# Altium footprint library jig.PcbLib: 30 footprints (part 1 of 2)
Each footprint in its own frame and in the unit in brackets; x right, y up, seen from the top. Pads: shape width x height; smd on the part's side, far side on the other; paste and mask are expansions set on the pad; w line width, h text height; cw(c..) or ccw(c..) is an arc to the next point about the centre after c.
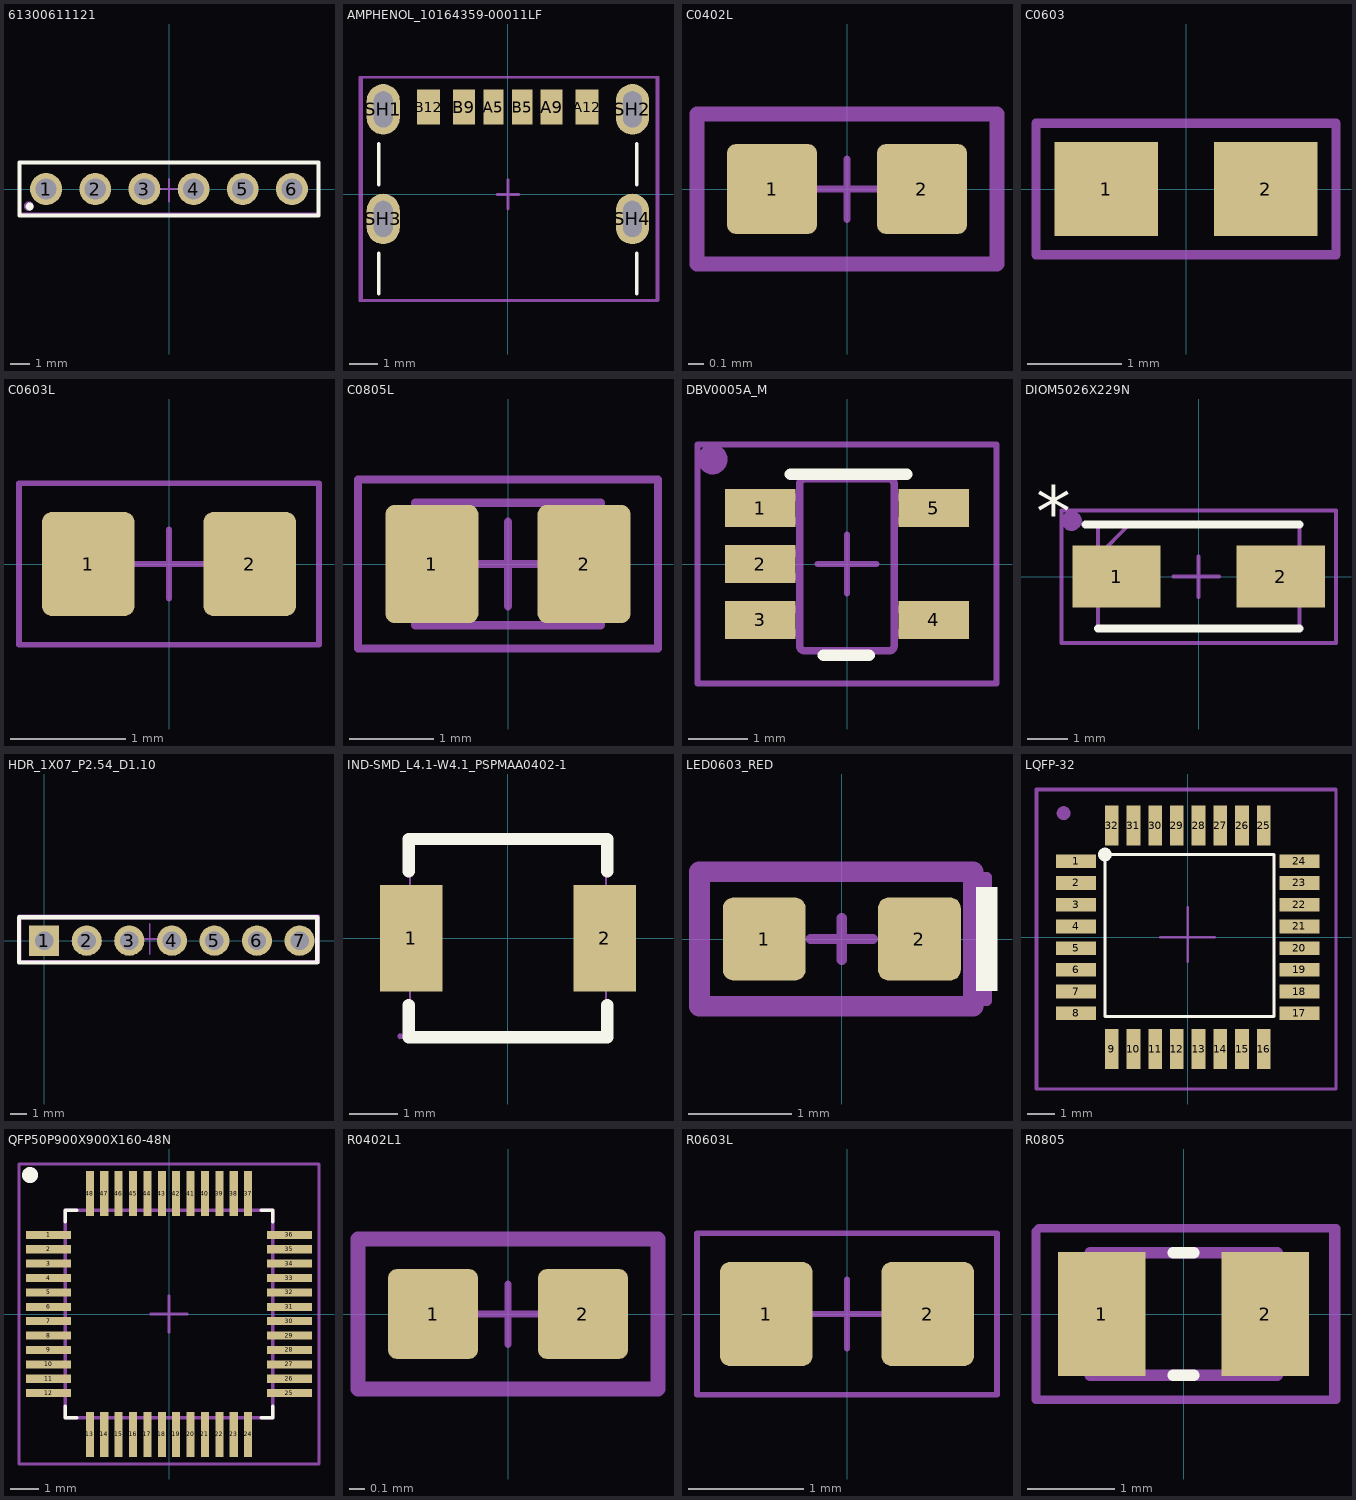
[diagram p0: the footprints below, top view; thin cyan lines are the x and y axes]

## 61300611121 [mm]
pads (6):
  round 1.65 hole 1.1: 1(-6.35,0) 2(-3.81,0) 3(-1.27,0) 4(1.27,0) 5(3.81,0) 6(6.35,0)
Top Overlay:
  circle w0.2: c-7.2,-0.9 r0.1
  lines w0.2: -7.72,-1.37 7.72,-1.37 7.72,1.37 -7.72,1.37 -7.72,-1.37
Mechanical 5:
  circle w0.254: c-7.239,-0.889 r0.127
  lines w0.1: -7.747,-1.27 7.747,-1.27 7.747,1.397 -7.747,1.397 -7.747,-1.27
  text ".Designator" at -1,-0.3 h1.52
Top Component Center (Mech15):
  lines w0.1: -0.635,0 0.635,0 ; 0,-0.635 0,0.508 ; -7.747,-1.397 7.747,-1.397 7.747,1.397 -7.747,1.397 -7.747,-1.397

## AMPHENOL_10164359-00011LF [mm]
height 3.26
pads (10):
  rect 0.7x1.2 smd: A5(-0.5,3.03) B5(0.5,3.03)
  rect 0.76x1.2 smd: A9(1.52,3.03) B9(-1.52,3.03)
  rect 0.8x1.2 smd: A12(2.75,3.03) B12(-2.75,3.03)
  oval 1.15x1.75 hole 0.65 slot 1.25 at 90 deg: SH1(-4.32,2.95) SH2(4.32,2.95) SH3(-4.32,-0.85) SH4(4.32,-0.85)
Top Overlay:
  lines w0.127: -4.47,-3.45 -4.47,-2.045 ; -4.47,0.345 -4.47,1.755 ; 4.47,-3.45 4.47,-2.045 ; 4.47,0.345 4.47,1.755
Mechanical 5:
  lines w0.1: -5.08,-3.683 5.207,-3.683 5.207,4.064 -5.08,4.064 -5.08,-3.683
  text ".Designator" at -0.612,-0.218 h1.52
Top Component Center (Mech15):
  lines w0.05: -5.145,-3.7 5.145,-3.7 5.145,4.075 -5.145,4.075 -5.145,-3.7
  lines w0.1: -0.381,0 0.381,0 ; 0,-0.508 0,0.508

## C0402L [mm]
height 0.7
pads (2):
  rrect20% 0.6x0.6 smd paste+0.05 mask+0.05: 1(-0.5,0) 2(0.5,0)
Mechanical 5:
  lines w0.1: -1,-0.5 1,-0.5 1,0.5 -1,0.5 -1,-0.5
  text ".Designator" at -0.725,-0.225 h0.7
Top Component Center (Mech15):
  lines w0.05: -0.2,0 0.2,0 ; 0,-0.2 0,0.2 ; -1,-0.5 1,-0.5 1,0.5 -1,0.5 -1,-0.5
3D body "User Library-Capacitor 0402.step": height 0.49, standoff -0.01, extent -0.5,-0.25 0.5,0.25

## C0603 [mm]
pads (2):
  rect 1.1x1 smd: 1(-0.85,0) 2(0.85,0)
Mechanical 5:
  lines w0.1: -1.6,-0.7 1.6,-0.7 1.6,0.7 -1.6,0.7 -1.6,-0.7
  text ".Designator" at -0.2,-0.255 h0.7
Top Component Center (Mech15):
  lines w0.051: -1.6,-0.7 1.6,-0.7 1.6,0.7 -1.6,0.7 -1.6,-0.7
3D body "step_temp.STEP": height 0.9, standoff 0, extent -0.8,-0.4 0.8,0.4

## C0603L [mm]
height 0.7
pads (2):
  rrect20% 0.8x0.9 smd mask+0.05: 1(-0.7,0) 2(0.7,0)
Mechanical 5:
  lines w0.05: -1.3,-0.7 -1.3,0.7 1.3,0.7 1.3,-0.7 -1.3,-0.7
  text ".Designator" at -1.02,-0.33 h1
Top Component Center (Mech15):
  lines w0.05: -0.3,0 0.3,0 ; 0,-0.3 0,0.3 ; -1.3,-0.7 -1.3,0.7 1.3,0.7 1.3,-0.7 -1.3,-0.7
3D body "CAPC1609X08M.step": height 0.8, standoff 0, extent -0.8,-0.45 0.8,0.45

## C0805L [mm]
height 0.7
pads (2):
  rrect20% 1.1x1.4 smd mask+0.05: 1(-0.9,0) 2(0.9,0)
Mechanical 5:
  lines w0.1: -1.775,-1 -1.775,1 1.775,1 1.775,-1 -1.775,-1
  text ".Designator" at -1.357,-0.413 h1.32
Mechanical 13:
  lines w0.1: -0.65,-0.725 -0.65,0.725 ; 0.65,-0.725 0.65,0.725 ; -1.1,-0.725 -1.1,0.725 1.1,0.725 1.1,-0.725 -1.1,-0.725
Top Component Center (Mech15):
  lines w0.1: -0.5,0 0.5,0 ; 0,-0.5 0,0.5 ; -1.775,-1 -1.775,1 1.775,1 1.775,-1 -1.775,-1
3D body: height 1.1, standoff 0, extent 0.651,-0.724 1.099,0.724
3D body: height 1.1, standoff 0, extent -0.649,-0.724 0.649,0.724
3D body: height 1.1, standoff 0, extent -1.099,-0.724 -0.651,0.724

## DBV0005A_M [mm]
pads (5):
  rect 1.2x0.65 smd paste+0 mask+0: 1(-1.475,0.95) 2(-1.475,0) 3(-1.475,-0.95) 4(1.475,-0.95) 5(1.475,0.95)
Top Overlay:
  lines w0.2: -0.959,1.524 1.016,1.524 ; -0.4,-1.55 0.375,-1.55
Mechanical 5:
  circle w0.254: c-2.286,1.778 r0.127
  lines w0.1: -2.54,-2.032 -2.54,2.032 2.54,2.032 2.54,-2.032 -2.54,-2.032
  text ".Designator" at -0.762,-0.127 h1.52
Mechanical 13:
  lines w0.127: -0.801,1.371 cw(c-0.725,1.37) -0.725,1.446 ; -0.801,1.37 -0.801,-1.399 -0.801,-1.4 ccw(c-0.725,-1.399) -0.725,-1.475 ; -0.801,1.37 -0.801,1.371 ; -0.725,-1.475 -0.725,-1.475 ; -0.725,-1.475 0.723,-1.475 0.724,-1.475 ccw(c0.723,-1.399) 0.799,-1.4 0.799,-1.399 0.799,1.37 ; -0.725,1.446 0.723,1.446 0.724,1.446 cw(c0.723,1.37) 0.799,1.371 ; -0.725,1.446 -0.725,1.446 ; 0.799,1.37 0.799,1.371 ; -1.423,-1.167 -1.199,-1.167 -1.105,-1.167 -1.088,-1.167 -0.835,-1.167 -0.801,-1.167 -0.801,-0.767 -0.835,-0.767 -1.088,-0.767 -1.105,-0.767 -1.199,-0.767 -1.423,-0.767 -1.423,-1.167 ; -1.423,-0.215 -1.199,-0.215 -1.105,-0.215 -1.088,-0.215 -0.835,-0.215 -0.801,-0.215 -0.801,0.186 -0.835,0.186 -1.088,0.186 -1.105,0.186 -1.199,0.186 -1.423,0.186 -1.423,-0.215 ; -1.423,0.738 -1.199,0.738 -1.105,0.738 -1.088,0.738 -0.835,0.738 -0.801,0.738 -0.801,1.138 -0.835,1.138 -1.088,1.138 -1.105,1.138 -1.199,1.138 -1.423,1.138 -1.423,0.738 ; 0.799,-1.167 0.799,-0.767 0.834,-0.767 1.087,-0.767 1.103,-0.767 1.198,-0.767 1.422,-0.767 1.422,-1.167 1.198,-1.167 1.103,-1.167 1.087,-1.167 0.834,-1.167 0.799,-1.167 ; 0.799,0.738 0.799,1.138 0.834,1.138 1.087,1.138 1.103,1.138 1.198,1.138 1.422,1.138 1.422,0.738 1.198,0.738 1.103,0.738 1.087,0.738 0.834,0.738 0.799,0.738
Top Component Center (Mech15):
  lines w0.05: -2.55,-2.05 -2.55,2.05 2.55,2.05 2.55,-2.05 -2.55,-2.05
  lines w0.1: -0.5,0 0.5,0 ; 0,-0.5 0,0.5

## DIOM5026X229N [mm]
pads (2):
  rect 2.2x1.55 smd paste+0 mask+0.102: 1(-2.05,0) 2(2.05,0)
Top Overlay:
  lines w0.2: -2.825,1.298 2.52,1.298 ; -2.52,-1.298 2.52,-1.298
  text "*" at -4.064,1.016 h1.27
Mechanical 5:
  circle w0.254: c-3.175,1.397 r0.127
  lines w0.1: -3.429,-1.651 -3.429,1.651 3.429,1.651 3.429,-1.651 -3.429,-1.651
  text ".Designator" at -1.905,0 h1.52
Mechanical 13:
  lines w0.1: -2.52,0.522 -1.745,1.298 ; -2.52,0.522 -2.52,1.298 -1.745,1.298 ; -2.52,0.522 -2.52,-1.298 2.52,-1.298 2.52,1.298 -1.745,1.298
Top Component Center (Mech15):
  lines w0.1: -0.635,0 0.508,0 ; 0,-0.508 0,0.508 ; -3.429,-1.651 3.429,-1.651 3.429,1.651 -3.429,1.651 -3.429,-1.651

## HDR_1X07_P2.54_D1.10 [mm]
pads (7):
  rect 1.8x1.8 hole 1.1: 1(0,0)
  round 1.8 hole 1.1: 2(2.54,0) 3(5.08,0) 4(7.62,0) 5(10.16,0) 6(12.7,0) 7(15.24,0)
Top Overlay:
  lines w0.254: -1.5,-1.3 -1.5,1.4 16.3,1.4 16.3,-1.3 -1.5,-1.3
Mechanical 5:
  lines w0.1: -1.4,-1.2 16.4,-1.2 16.4,1.3 -1.4,1.3 -1.4,-1.2
  text ".Designator" at 6.1,-0.1 h1.52
Top Component Center (Mech15):
  lines w0.1: 5.2,0.1 7.4,0.1 ; 6.3,-0.8 6.3,1 ; -1.5,-1.3 -1.5,1.5 16.4,1.5 16.4,-1.3 -1.5,-1.3
3D body "pin_header_7.STEP": height 10.62, standoff -3.38, extent -1.471,-1.21 16.309,1.33

## IND-SMD_L4.1-W4.1_PSPMAA0402-1 [mm]
pads (2):
  rect 1.3x2.2 smd: 1(-1.999,0) 2(2.002,0)
Top Overlay:
  lines w0.254: -2.05,-1.382 -2.05,-2.05 2.05,-2.05 2.05,-1.382 ; -2.05,1.382 -2.05,2.05 2.05,2.05 2.05,1.382
Mechanical 7:
  lines w0.051: -2.024,-2.024 2.027,-2.024 2.027,2.024 -2.024,2.024 -2.024,-2.024
Mechanical 8:
  region: -2.164,-2.024 -2.174,-2.057 -2.2,-2.08 -2.233,-2.085 -2.263,-2.07 -2.281,-2.042 -2.281,-2.009 -2.263,-1.981 -2.233,-1.966 -2.2,-1.971 -2.174,-1.994
Mechanical 9:
  region: 1.425,1.001 2.225,1.001 2.225,-1.001 1.425,-1.001
  region: -2.225,1.001 -1.425,1.001 -1.425,-1.001 -2.225,-1.001
3D body "IND_SRP4020TA_BRN.step": height 2.01, standoff 0, extent -2.35,-2.159 2.35,2.159

## LED0603_RED [mm]
height 0.7
pads (2):
  rrect25% 0.8x0.8 smd mask+0.05: 1(-0.75,0) 2(0.75,0)
Top Overlay:
  region: 1.5,-0.5 1.5,0.5 1.3,0.5 1.3,-0.5
Mechanical 5:
  lines w0.2: -1.375,-0.65 -1.375,0.65 1.27,0.65 1.27,-0.65 -1.375,-0.65
  text ".Designator" at 0,0 h0.7
Top Component Center (Mech15):
  lines w0.1: -0.3,0 0.3,0 ; 0,-0.2 0,0.2 ; -1.4,-0.6 1.4,-0.6 1.4,0.6 -1.4,0.6 -1.4,-0.6
3D body "User Library-LED_0603_R.STEP": height 0.6, standoff 0, extent -0.8,-0.4 0.8,0.4

## LQFP-32 [mm]
pads (32):
  rect 1.462x0.507 smd paste+0 mask+0: 1(-4.115,2.8) 2(-4.115,2) 3(-4.115,1.2) 4(-4.115,0.4) 5(-4.115,-0.4) 6(-4.115,-1.2) 7(-4.115,-2) 8(-4.115,-2.8) 17(4.115,-2.8) 18(4.115,-2) 19(4.115,-1.2) 20(4.115,-0.4) 21(4.115,0.4) 22(4.115,1.2) 23(4.115,2) 24(4.115,2.8)
  rect 0.507x1.462 smd paste+0 mask+0: 9(-2.8,-4.115) 10(-2,-4.115) 11(-1.2,-4.115) 12(-0.4,-4.115) 13(0.4,-4.115) 14(1.2,-4.115) 15(2,-4.115) 16(2.8,-4.115) 25(2.8,4.115) 26(2,4.115) 27(1.2,4.115) 28(0.4,4.115) 29(-0.4,4.115) 30(-1.2,4.115) 31(-2,4.115) 32(-2.8,4.115)
Top Overlay:
  circle w0.254: c-3.048,3.048 r0.127
  lines w0.1: -3.048,-2.921 -3.048,3.048 3.175,3.048 3.175,-2.921 -3.048,-2.921
Mechanical 5:
  circle w0.254: c-4.572,4.572 r0.127
  lines w0.1: -5.588,-5.588 -5.588,5.461 5.461,5.461 5.461,-5.588 -5.588,-5.588
  text ".Designator" at -1.524,0 h1.52
Top Component Center (Mech15):
  lines w0.1: -1.016,0 0.984,0 ; 0,-0.889 0,1.111 ; -5.539,-5.588 5.461,-5.588 5.461,5.412 -5.539,5.412 -5.539,-5.588

## QFP50P900X900X160-48N [mm]
pads (48):
  rect 1.56x0.28 smd: 1(-4.18,2.75) 2(-4.18,2.25) 3(-4.18,1.75) 4(-4.18,1.25) 5(-4.18,0.75) 6(-4.18,0.25) 7(-4.18,-0.25) 8(-4.18,-0.75) 9(-4.18,-1.25) 10(-4.18,-1.75) 11(-4.18,-2.25) 12(-4.18,-2.75) 25(4.18,-2.75) 26(4.18,-2.25) 27(4.18,-1.75) 28(4.18,-1.25) 29(4.18,-0.75) 30(4.18,-0.25) 31(4.18,0.25) 32(4.18,0.75) 33(4.18,1.25) 34(4.18,1.75) 35(4.18,2.25) 36(4.18,2.75)
  rect 0.28x1.56 smd: 13(-2.75,-4.18) 14(-2.25,-4.18) 15(-1.75,-4.18) 16(-1.25,-4.18) 17(-0.75,-4.18) 18(-0.25,-4.18) 19(0.25,-4.18) 20(0.75,-4.18) 21(1.25,-4.18) 22(1.75,-4.18) 23(2.25,-4.18) 24(2.75,-4.18) 37(2.75,4.18) 38(2.25,4.18) 39(1.75,4.18) 40(1.25,4.18) 41(0.75,4.18) 42(0.25,4.18) 43(-0.25,4.18) 44(-0.75,4.18) 45(-1.25,4.18) 46(-1.75,4.18) 47(-2.25,4.18) 48(-2.75,4.18)
Top Overlay:
  circle w0.3: c-4.826,4.826 r0.127
  lines w0.127: -3.6,-3.21 -3.6,-3.6 -3.21,-3.6 ; -3.6,3.21 -3.6,3.6 -3.21,3.6 ; 3.21,-3.6 3.6,-3.6 3.6,-3.21 ; 3.21,3.6 3.6,3.6 3.6,3.21
Mechanical 5:
  circle w0.254: c-4.826,4.826 r0.127
  lines w0.1: -5.207,-5.207 -5.207,5.207 5.207,5.207 5.207,-5.207 -5.207,-5.207
  text ".Designator" at -0.889,0 h1.52
Mechanical 13:
  lines w0.127: -3.6,-3.6 -3.6,3.6 3.6,3.6 3.6,-3.6 -3.6,-3.6
Top Component Center (Mech15):
  lines w0.05: -5.21,-5.21 -5.21,5.21 5.21,5.21 5.21,-5.21 -5.21,-5.21
  lines w0.1: -0.635,0 0.635,0 ; 0,-0.635 0,0.635
3D body "step_temp.STEP": height 1.6, standoff 0, extent -4.5,-4.5 4.5,4.5

## R0402L1 [mm]
height 0.51
pads (2):
  rrect20% 0.6x0.6 smd paste+0.05 mask+0.05: 1(-0.5,0) 2(0.5,0)
Mechanical 5:
  lines w0.1: -1,-0.5 1,-0.5 1,0.5 -1,0.5 -1,-0.5
  text ".Designator" at -0.725,-0.225 h0.7
Top Component Center (Mech15):
  lines w0.05: -0.2,0 0.2,0 ; 0,-0.2 0,0.2 ; -1,-0.5 1,-0.5 1,0.5 -1,0.5 -1,-0.5
3D body "User Library-0402(1005M) Res.step": height 0.51, standoff 0, extent -0.5,-0.254 0.516,0.254

## R0603L [mm]
height 0.7
pads (2):
  rrect20% 0.8x0.9 smd mask+0.05: 1(-0.7,0) 2(0.7,0)
Top Component Center:
  lines w0.05: -0.3,0 0.3,0 ; 0,-0.3 0,0.3 ; -1.3,-0.7 -1.3,0.7 1.3,0.7 1.3,-0.7 -1.3,-0.7
Mechanical 5:
  lines w0.05: -1.3,-0.7 -1.3,0.7 1.3,0.7 1.3,-0.7 -1.3,-0.7
  text ".Designator" at -0.381,0 h1
3D body "RESC1609X08M.step": height 0.8, standoff 0, extent -0.8,-0.45 0.8,0.45

## R0805 [mm]
pads (2):
  rect 1x1.42 smd: 1(-0.935,0) 2(0.935,0)
Top Overlay:
  lines w0.127: -0.12,-0.7 0.12,-0.7 ; -0.12,0.7 0.12,0.7
Mechanical 5:
  lines w0.1: -1.688,-0.979 -1.688,0.947 -1.679,0.955 -1.663,0.971 -1.655,0.979 1.741,0.979 1.741,-0.979 -1.688,-0.979
  text ".Designator" at -0.254,-0.127 h1.52
Mechanical 13:
  lines w0.127: -1.07,-0.7 1.07,-0.7 1.07,0.7 -1.07,0.7 -1.07,-0.7
Top Component Center (Mech15):
  lines w0.05: -1.685,-0.96 1.685,-0.96 1.685,0.96 -1.685,0.96 -1.685,-0.96
3D body "step_temp.STEP": height 0.6, standoff 0, extent -1,-0.625 1,0.625